# Altium footprint library conn.PcbLib: 101 footprints (part 5 of 7)
Each footprint in its own frame and in the unit in brackets; x right, y up, seen from the top. Pads: shape width x height; smd on the part's side, far side on the other; paste and mask are expansions set on the pad; w line width, h text height; cw(c..) or ccw(c..) is an arc to the next point about the centre after c.
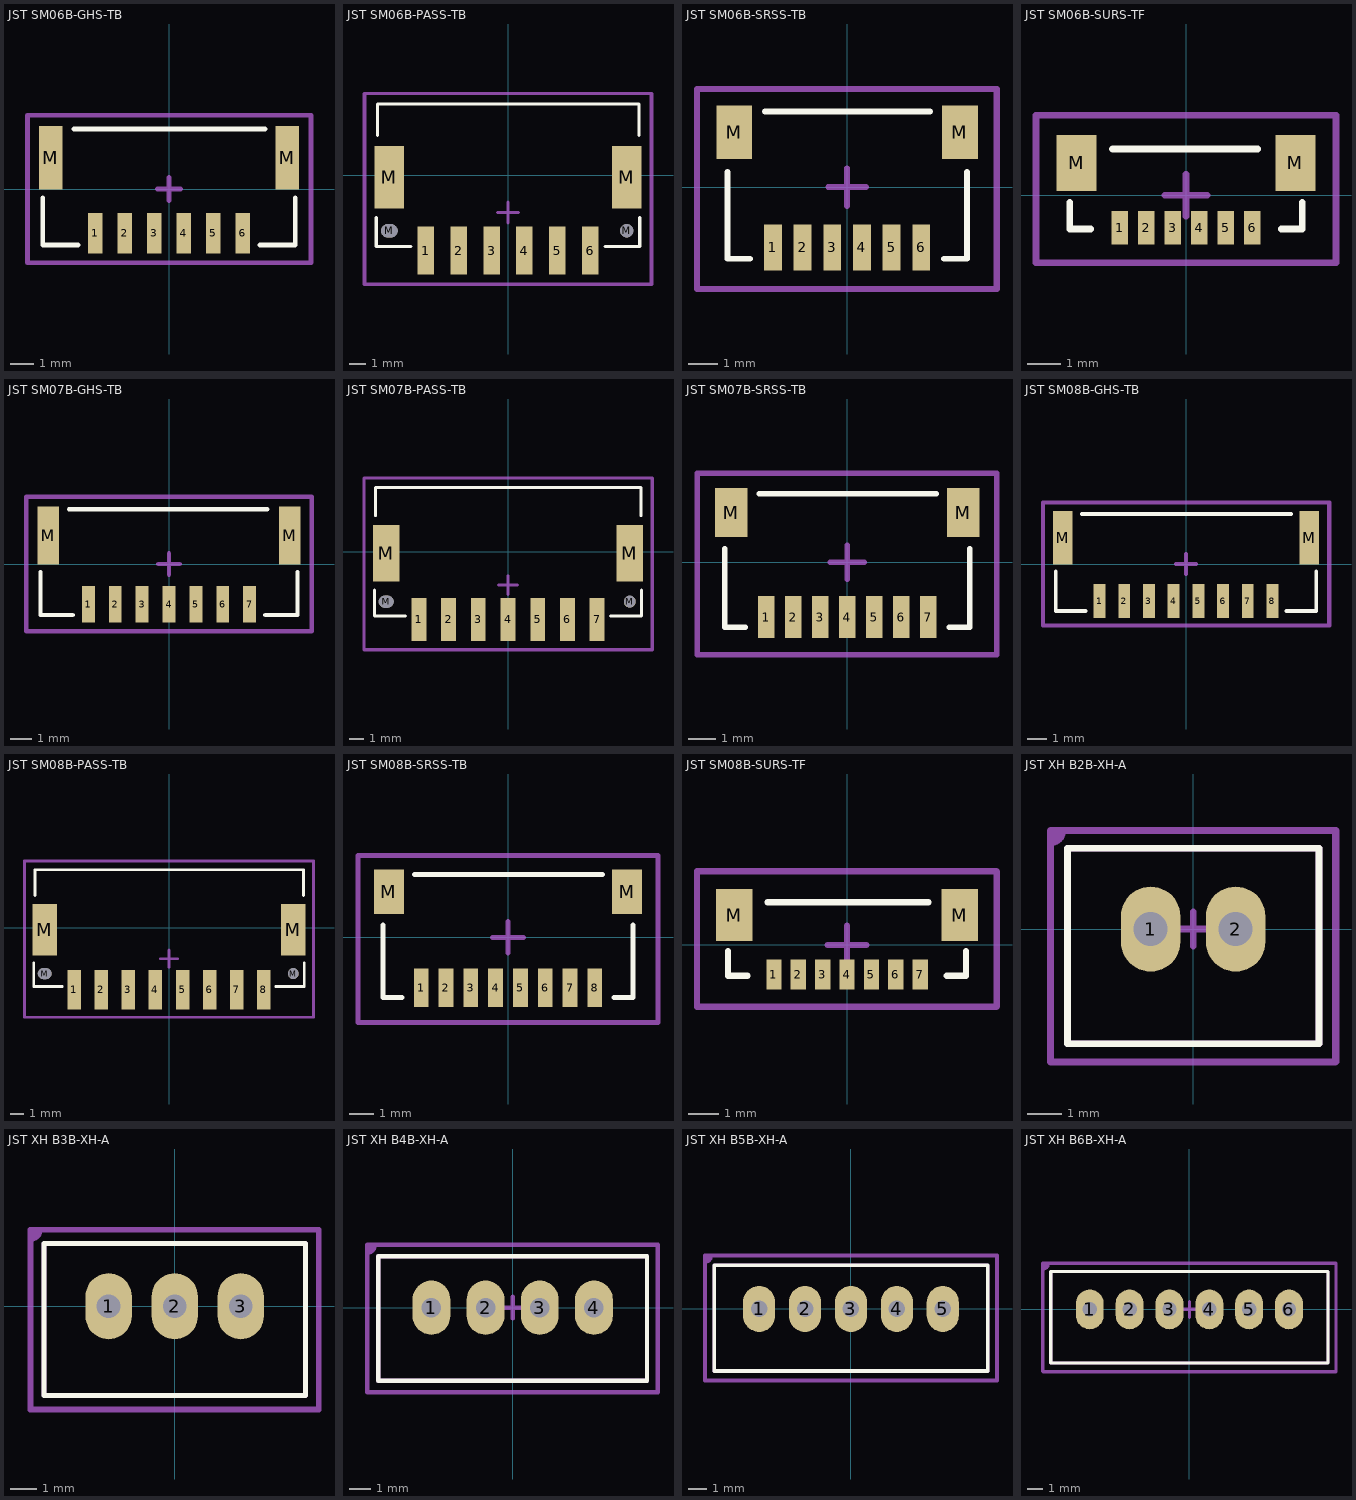
[diagram p4: the footprints below, top view; thin cyan lines are the x and y axes]

## JST SM06B-GHS-TB [mm] "1.25mm pitch/Disconnectable Crimp style connectors"
height 4.35
pads (8):
  rect 0.6x1.7 smd: 1(-3.125,-1.875) 2(-1.875,-1.875) 3(-0.625,-1.875) 4(0.625,-1.875) 5(1.875,-1.875) 6(3.125,-1.875)
  rect 1x2.7 smd: M(-5,1.325) M(5,1.325)
Top Overlay:
  lines w0.2: -5.35,-0.375 -5.35,-2.375 -3.85,-2.375 ; -4.024,2.54 4.064,2.54 ; 3.85,-2.375 5.35,-2.375 5.35,-0.375
Top Component:
  lines w0.203: -5.994,-3.124 6.02,-3.124 6.02,3.124 -5.994,3.124 -5.994,-3.124
  text ".Designator" at -0.813,-0.559 h2.03
Component Center:
  lines w0.2: -0.5,0 0.5,0 ; 0,-0.5 0,0.5 ; -6,-3.125 -6,3.125 6,3.125 6,-3.125 -6,-3.125
3D body "JST SM06B-GHS-TB.STEP": height 4.35, standoff 0, extent -5.375,-2.31 5.375,2.54

## JST SM06B-PASS-TB [mm] "JST PA Series 2mm pitch, side entry connector"
height 5.7
pads (10):
  rect 1x2.9 smd: 1(-5,-4.575) 2(-3,-4.575) 3(-1,-4.575) 4(1,-4.575) 5(3,-4.575) 6(5,-4.575)
  oval 1x0.8 hole 0.8 slot 1 at 0 deg unplated mask+0.102: M(-7.2,-3.375)
  rect 1.8x3.8 smd: M(-7.2,-0.125) M(7.2,-0.125)
  round 0.8 hole 0.8 unplated mask+0.102: M(7.2,-3.375)
Top Overlay:
  lines w0.2: -8,-2.575 -8,-4.325 -5.905,-4.325 ; -7.921,2.41 -7.921,4.315 7.953,4.315 7.953,2.41 ; 5.905,-4.325 8,-4.325 8,-2.575
Top Component:
  lines w0.203: -8.712,-6.629 -8.712,4.953 8.712,4.953 8.712,-6.629 -8.712,-6.629
  text ".Designator" at -0.838,-0.559 h2.03
Component Center:
  lines w0.2: -0.635,-2.265 0.635,-2.265 ; 0,-2.9 0,-1.63 ; -8.699,-6.607 -8.699,4.953 8.699,4.953 8.699,-6.607 -8.699,-6.607
3D body "JST SM06B-PASS-TB.STEP": height 5.8, standoff 0, extent -8,-5.641 8,4.359

## JST SM06B-SRSS-TB [mm] "1.0mm pitch/Disconnectable Crimp style connector"
height 2.95
pads (8):
  rect 0.6x1.55 smd: 1(-2.5,-2.032) 2(-1.5,-2.032) 3(-0.5,-2.032) 4(0.5,-2.032) 5(1.5,-2.032) 6(2.5,-2.032)
  rect 1.2x1.8 smd: M(-3.8,1.843) M(3.8,1.843)
Top Overlay:
  lines w0.2: -4.032,0.508 -4.032,-2.413 -3.27,-2.413 ; -2.762,2.54 2.794,2.54 ; 3.27,-2.413 4.032,-2.413 4.032,0.508
Top Component:
  lines w0.203: -5.055,-3.429 5.029,-3.429 5.029,3.302 -5.055,3.302 -5.055,-3.429
  text ".Designator" at -0.813,-0.559 h2.03
Component Center:
  lines w0.2: -0.635,0 0.635,0 ; 0,-0.635 0,0.635 ; -5.048,-3.429 -5.048,3.302 5.048,3.302 5.048,-3.429 -5.048,-3.429
3D body "JST SM06B-SRSS-TB.STEP": height 2.95, standoff -0.01, extent -4,-2.383 4,2.567

## JST SM06B-SURS-TF [mm] "1.0mm pitch/Disconnectable Crimp style connector"
height 2.95
pads (8):
  rect 0.5x1 smd: 1(-2,-0.975) 2(-1.2,-0.975) 3(-0.4,-0.975) 4(0.4,-0.975) 5(1.2,-0.975) 6(2,-0.975)
  rect 1.2x1.7 smd: M(-3.3,0.975) M(3.3,0.975)
Top Overlay:
  lines w0.2: -3.505,-0.213 -3.505,-1.016 -2.87,-1.016 ; -2.216,1.397 2.159,1.397 ; 2.87,-1.016 3.505,-1.016 3.505,-0.213
Top Component:
  lines w0.203: -4.521,-2.032 4.521,-2.032 4.521,2.413 -4.521,2.413 -4.521,-2.032
  text ".Designator" at -0.813,-0.559 h2.03
Component Center:
  lines w0.2: -0.635,0 0.635,0 ; 0,-0.635 0,0.635 ; -4.521,-2.032 -4.521,2.413 4.521,2.413 4.521,-2.032 -4.521,-2.032
3D body "JST SM06B-SURS-TF.STEP": height 1.75, standoff 0, extent -3.5,-1.303 3.5,1.397

## JST SM07B-GHS-TB [mm] "1.25mm pitch/Disconnectable Crimp style connectors"
height 4.35
pads (9):
  rect 0.6x1.7 smd: 1(-3.75,-1.875) 2(-2.5,-1.875) 3(-1.25,-1.875) 4(0,-1.875) 5(1.25,-1.875) 6(2.5,-1.875) 7(3.75,-1.875)
  rect 1x2.7 smd: M(-5.625,1.325) M(5.625,1.325)
Top Overlay:
  lines w0.2: -5.975,-0.375 -5.975,-2.375 -4.475,-2.375 ; -4.649,2.54 4.572,2.54 ; 4.475,-2.375 5.975,-2.375 5.975,-0.375
Top Component:
  lines w0.203: -6.629,-3.124 -6.629,3.124 6.629,3.124 6.629,-3.124 -6.629,-3.124
  text ".Designator" at -0.813,-0.559 h2.03
Component Center:
  lines w0.2: -0.5,0 0.5,0 ; 0,-0.5 0,0.5 ; -6.625,-3.125 -6.625,3.125 6.625,3.125 6.625,-3.125 -6.625,-3.125
3D body "JST SM07B-GHS-TB.STEP": height 4.35, standoff 0, extent -6,-2.31 6,2.54

## JST SM07B-PASS-TB [mm] "JST PA Series 2mm pitch, side entry connector"
height 5.7
pads (11):
  rect 1x2.9 smd: 1(-6,-4.575) 2(-4,-4.575) 3(-2,-4.575) 4(0,-4.575) 5(2,-4.575) 6(4,-4.575) 7(6,-4.575)
  oval 1x0.8 hole 0.8 slot 1 at 0 deg unplated mask+0.102: M(-8.2,-3.375)
  rect 1.8x3.8 smd: M(-8.2,-0.125) M(8.2,-0.125)
  round 0.8 hole 0.8 unplated mask+0.102: M(8.2,-3.375)
Top Overlay:
  lines w0.2: -9,-2.575 -9,-4.325 -6.905,-4.325 ; -8.921,2.41 -8.921,4.315 8.953,4.315 8.953,2.41 ; 6.905,-4.325 9,-4.325 9,-2.575
Top Component:
  lines w0.203: -9.703,-6.629 9.728,-6.629 9.728,4.953 -9.703,4.953 -9.703,-6.629
  text ".Designator" at -0.813,-0.61 h2.03
Component Center:
  lines w0.2: -0.635,-2.265 0.635,-2.265 ; 0,-2.9 0,-1.63 ; -9.699,-6.607 -9.699,4.953 9.699,4.953 9.699,-6.607 -9.699,-6.607
3D body "JST SM07B-PASS-TB.STEP": height 5.8, standoff 0, extent -9,-5.641 9,4.359

## JST SM07B-SRSS-TB [mm] "1.0mm pitch/Disconnectable Crimp style connector"
height 2.95
pads (9):
  rect 0.6x1.55 smd: 1(-3,-2.032) 2(-2,-2.032) 3(-1,-2.032) 4(0,-2.032) 5(1,-2.032) 6(2,-2.032) 7(3,-2.032)
  rect 1.2x1.8 smd: M(-4.3,1.843) M(4.3,1.843)
Top Overlay:
  lines w0.2: -4.532,0.508 -4.532,-2.413 -3.77,-2.413 ; -3.262,2.54 3.302,2.54 ; 3.77,-2.413 4.532,-2.413 4.532,0.508
Top Component:
  lines w0.203: -5.563,-3.429 -5.563,3.302 5.537,3.302 5.537,-3.429 -5.563,-3.429
  text ".Designator" at -0.813,-0.559 h2.03
Component Center:
  lines w0.2: -0.635,0 0.635,0 ; 0,-0.635 0,0.635 ; -5.548,-3.429 -5.548,3.302 5.548,3.302 5.548,-3.429 -5.548,-3.429
3D body "JST SM07B-SRSS-TB.STEP": height 2.95, standoff -0.01, extent -4.5,-2.383 4.5,2.567

## JST SM08B-GHS-TB [mm] "1.25mm pitch/Disconnectable Crimp style connectors"
height 4.35
pads (10):
  rect 0.6x1.7 smd: 1(-4.375,-1.875) 2(-3.125,-1.875) 3(-1.875,-1.875) 4(-0.625,-1.875) 5(0.625,-1.875) 6(1.875,-1.875) 7(3.125,-1.875) 8(4.375,-1.875)
  rect 1x2.7 smd: M(-6.25,1.325) M(6.25,1.325)
Top Overlay:
  lines w0.2: -6.6,-0.375 -6.6,-2.375 -5.1,-2.375 ; -5.274,2.54 5.334,2.54 ; 5.1,-2.375 6.6,-2.375 6.6,-0.375
Top Component:
  lines w0.203: -7.239,-3.124 -7.239,3.124 7.264,3.124 7.264,-3.124 -7.239,-3.124
  text ".Designator" at -3.251,-0.381 h2.03
Component Center:
  lines w0.2: -0.5,0 0.5,0 ; 0,-0.5 0,0.5 ; -7.25,-3.125 -7.25,3.125 7.25,3.125 7.25,-3.125 -7.25,-3.125
3D body "JST SM08B-GHS-TB.STEP": height 4.35, standoff -0.05, extent -6.625,-2.31 6.625,2.54

## JST SM08B-PASS-TB [mm] "JST PA Series 2mm pitch, side entry connector"
height 5.7
pads (12):
  rect 1x2.9 smd: 1(-7,-4.575) 2(-5,-4.575) 3(-3,-4.575) 4(-1,-4.575) 5(1,-4.575) 6(3,-4.575) 7(5,-4.575) 8(7,-4.575)
  oval 1x0.8 hole 0.8 slot 1 at 0 deg unplated mask+0.102: M(-9.2,-3.375)
  rect 1.8x3.8 smd: M(-9.2,-0.125) M(9.2,-0.125)
  round 0.8 hole 0.8 unplated mask+0.102: M(9.2,-3.375)
Top Overlay:
  lines w0.2: -10,-2.575 -10,-4.325 -7.905,-4.325 ; -9.921,2.41 -9.921,4.315 9.953,4.315 9.953,2.41 ; 7.905,-4.325 10,-4.325 10,-2.575
Top Component:
  lines w0.203: -10.693,-6.604 -10.693,4.978 10.719,4.978 10.719,-6.604 -10.693,-6.604
  text ".Designator" at -0.813,-0.559 h2.03
Component Center:
  lines w0.2: -0.635,-2.265 0.635,-2.265 ; 0,-2.9 0,-1.63 ; -10.699,-6.607 -10.699,4.953 10.699,4.953 10.699,-6.607 -10.699,-6.607
3D body "JST SM08B-PASS-TB.STEP": height 5.8, standoff 0, extent -10,-5.641 10,4.359

## JST SM08B-SRSS-TB [mm] "1.0mm pitch/Disconnectable Crimp style connector"
height 2.95
pads (10):
  rect 0.6x1.55 smd: 1(-3.5,-2.032) 2(-2.5,-2.032) 3(-1.5,-2.032) 4(-0.5,-2.032) 5(0.5,-2.032) 6(1.5,-2.032) 7(2.5,-2.032) 8(3.5,-2.032)
  rect 1.2x1.8 smd: M(-4.8,1.843) M(4.8,1.843)
Top Overlay:
  lines w0.2: -5.032,0.508 -5.032,-2.413 -4.27,-2.413 ; -3.762,2.54 3.81,2.54 ; 4.27,-2.413 5.032,-2.413 5.032,0.508
Top Component:
  lines w0.203: -6.045,-3.429 -6.045,3.302 6.045,3.302 6.045,-3.429 -6.045,-3.429
  text ".Designator" at -0.813,-0.559 h2.03
Component Center:
  lines w0.2: -0.635,0 0.635,0 ; 0,-0.635 0,0.635 ; -6.048,-3.429 -6.048,3.302 6.048,3.302 6.048,-3.429 -6.048,-3.429
3D body "JST SM08B-SRSS-TB.STEP": height 2.95, standoff -0.01, extent -5,-2.383 5,2.567

## JST SM08B-SURS-TF [mm] "1.0mm pitch/Disconnectable Crimp style connector"
height 2.95
pads (9):
  rect 0.5x1 smd: 1(-2.4,-0.975) 2(-1.6,-0.975) 3(-0.8,-0.975) 4(0,-0.975) 5(0.8,-0.975) 6(1.6,-0.975) 7(2.4,-0.975)
  rect 1.2x1.7 smd: M(-3.7,0.975) M(3.7,0.975)
Top Overlay:
  lines w0.2: -3.905,-0.213 -3.905,-1.016 -3.27,-1.016 ; -2.616,1.397 2.667,1.397 ; 3.27,-1.016 3.905,-1.016 3.905,-0.213
Top Component:
  lines w0.203: -4.928,-2.032 4.902,-2.032 4.902,2.413 -4.928,2.413 -4.928,-2.032
  text ".Designator" at -0.813,-0.584 h2.03
Component Center:
  lines w0.2: -0.635,0 0.635,0 ; 0,-0.635 0,0.635 ; -4.921,-2.032 -4.921,2.413 4.921,2.413 4.921,-2.032 -4.921,-2.032
3D body "JST SM08B-SURS-TF.STEP": height 1.75, standoff 0, extent -4.3,-1.303 4.3,1.397

## JST XH B2B-XH-A [mm]
height 7
pads (2):
  oval 1.75x2.5 hole 1: 1(-1.25,0) 2(1.25,0)
Top Overlay:
  lines w0.2: -3.7,-3.375 3.7,-3.375 3.7,2.375 -3.7,2.375 -3.7,-3.375
Mechanical 1:
  lines w0.2: -3.7,-3.375 -3.7,2.375 3.7,2.375 3.7,-3.375 -3.7,-3.375
Top Component:
  region: -4.191,2.896 -4.191,2.458 -4.108,2.458 -4.057,2.509 -3.974,2.509 -3.796,2.686 -3.796,2.777 -3.76,2.813 -3.76,2.896
  lines w0.051: -4.191,2.464 ccw(c-4.191,2.896) -3.76,2.896
  lines w0.203: -4.191,-3.912 4.191,-3.912 4.191,2.896 -4.191,2.896 -4.191,-3.912
  text ".Designator" at -0.813,-0.559 h2.03
Component Center:
  lines w0.2: -0.5,0 0.5,0 ; 0,-0.5 0,0.5 ; -4.2,-3.9 4.2,-3.9 4.2,2.9 -4.2,2.9 -4.2,-3.9
3D body "JST B2B-XH-A.STEP": height 7, standoff -3.4, extent -3.7,-3.375 3.7,2.375

## JST XH B3B-XH-A [mm]
height 7
pads (3):
  oval 1.75x2.5 hole 0.9: 1(-2.5,0) 2(0,0) 3(2.5,0)
Top Overlay:
  lines w0.2: -4.95,-3.375 -4.95,2.375 4.95,2.375 4.95,-3.375 -4.95,-3.375
Mechanical 1:
  lines w0.2: -4.95,-3.375 4.95,-3.375 4.95,2.375 -4.95,2.375 -4.95,-3.375
Top Component:
  region: -5.461,2.896 -5.461,2.458 -5.378,2.458 -5.327,2.509 -5.244,2.509 -5.066,2.686 -5.066,2.777 -5.03,2.813 -5.03,2.896
  lines w0.051: -5.461,2.464 ccw(c-5.461,2.896) -5.03,2.896
  lines w0.203: -5.461,-3.912 5.461,-3.912 5.461,2.896 -5.461,2.896 -5.461,-3.912
  text ".Designator" at -0.813,-0.584 h2.03
Component Center:
  lines w0.2: -0.5,0 0.5,0 ; 0,-0.5 0,0.5 ; -5.45,-3.9 -5.45,2.9 5.45,2.9 5.45,-3.9 -5.45,-3.9
3D body "JST B3B-XH-A.STEP": height 7, standoff -3.4, extent -4.95,-3.375 4.95,2.375

## JST XH B4B-XH-A [mm]
height 7
pads (4):
  oval 1.75x2.5 hole 0.9: 1(-3.75,0) 2(-1.25,0) 3(1.25,0) 4(3.75,0)
Top Overlay:
  lines w0.2: -6.2,-3.375 6.2,-3.375 6.2,2.375 -6.2,2.375 -6.2,-3.375
Mechanical 1:
  lines w0.2: -6.2,-3.375 -6.2,2.375 6.2,2.375 6.2,-3.375 -6.2,-3.375
Top Component:
  region: -6.706,2.896 -6.706,2.458 -6.622,2.458 -6.571,2.509 -6.489,2.509 -6.311,2.686 -6.311,2.777 -6.274,2.813 -6.274,2.896
  lines w0.051: -6.706,2.464 ccw(c-6.706,2.896) -6.274,2.896
  lines w0.203: -6.706,-3.912 6.706,-3.912 6.706,2.896 -6.706,2.896 -6.706,-3.912
  text ".Designator" at -0.813,-0.559 h2.03
Component Center:
  lines w0.2: -0.5,0 0.5,0 ; 0,-0.5 0,0.5 ; -6.7,-3.9 -6.7,2.9 6.7,2.9 6.7,-3.9 -6.7,-3.9
3D body "JST B4B-XH-A.STEP": height 7, standoff -3.4, extent -6.2,-3.375 6.2,2.375

## JST XH B5B-XH-A [mm]
height 7
pads (5):
  oval 1.75x2.5 hole 0.9: 1(-5,0) 2(-2.5,0) 3(0,0) 4(2.5,0) 5(5,0)
Top Overlay:
  lines w0.2: -7.45,-3.375 7.45,-3.375 7.45,2.375 -7.45,2.375 -7.45,-3.375
Mechanical 1:
  lines w0.2: -7.45,-3.375 -7.45,2.375 7.45,2.375 7.45,-3.375 -7.45,-3.375
Top Component:
  region: -7.95,2.921 -7.95,2.483 -7.867,2.483 -7.816,2.534 -7.733,2.534 -7.555,2.712 -7.555,2.802 -7.519,2.839 -7.519,2.921
  lines w0.051: -7.95,2.49 ccw(c-7.95,2.921) -7.519,2.921
  lines w0.203: -7.95,-3.886 7.95,-3.886 7.95,2.921 -7.95,2.921 -7.95,-3.886
  text ".Designator" at -0.813,-0.559 h2.03
Component Center:
  lines w0.2: -0.5,0 0.5,0 ; 0,-0.5 0,0.5 ; -7.95,-3.9 -7.95,2.9 7.95,2.9 7.95,-3.9 -7.95,-3.9
3D body "JST B5B-XH-A.STEP": height 7, standoff -3.4, extent -7.45,-3.375 7.45,2.375

## JST XH B6B-XH-A [mm]
height 7
pads (6):
  oval 1.75x2.5 hole 0.9: 1(-6.25,0) 2(-3.75,0) 3(-1.25,0) 4(1.25,0) 5(3.75,0) 6(6.25,0)
Top Overlay:
  lines w0.2: -8.7,-3.375 -8.7,2.375 8.7,2.375 8.7,-3.375 -8.7,-3.375
Mechanical 1:
  lines w0.2: -8.7,-3.375 8.7,-3.375 8.7,2.375 -8.7,2.375 -8.7,-3.375
Top Component:
  region: -9.195,2.896 -9.195,2.458 -9.111,2.458 -9.061,2.509 -8.978,2.509 -8.8,2.686 -8.8,2.777 -8.764,2.813 -8.764,2.896
  lines w0.051: -9.195,2.464 ccw(c-9.195,2.896) -8.764,2.896
  lines w0.203: -9.195,-3.912 9.195,-3.912 9.195,2.896 -9.195,2.896 -9.195,-3.912
  text ".Designator" at -0.813,-0.559 h2.03
Component Center:
  lines w0.2: -0.5,0 0.5,0 ; 0,-0.5 0,0.5 ; -9.2,-3.9 -9.2,2.9 9.2,2.9 9.2,-3.9 -9.2,-3.9
3D body "JST B6B-XH-A.STEP": height 7, standoff -3.4, extent -8.7,-3.375 8.7,2.375